# EAGLE library part BGB_741L7ESD_E6327 (library BGB_741L7ESD_E6327)
Infineon BGB741L7ESD BGB 741L7ESD E6327, RF Amplifier Low Noise, 21.5 dB 5 GHz, 6-Pin TSLP-7-1 Source: Datasheet <https://www.infineon.com/dgdl/Infineon-BGB741L7ESD-DS-v03_00-EN.pdf?fileId=5546d46265f064ff016638972c994ed7&redirId=115243>
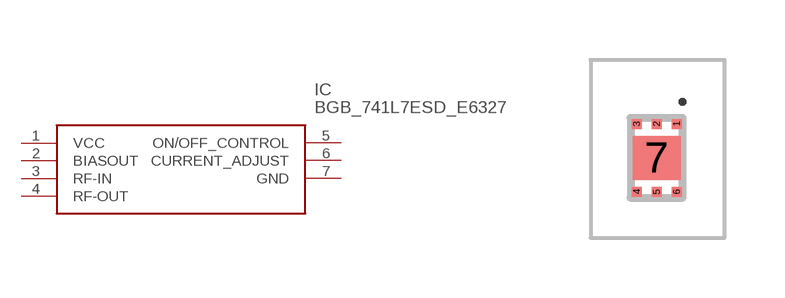
[diagram p0: symbol with the pads of BGB741L7ESDE6327; footprint BGB741L7ESDE6327]

Designator prefix IC

## BGB_741L7ESD_E6327 (Description: Infineon BGB741L7ESD BGB 741L7ESD E6327, RF Amplifier Low Noise, 21.5 dB 5 GHz, 6-Pin TSLP-7-1; Height: 0.55mm; Manufacturer_Name: Infineon; Manufacturer_Part_Number: BGB 741L7ESD E6327; Mouser_Part_Number: 726-BGB741L7ESDE63; Mouser_Price-Stock: https://www.mouser.co.uk/ProductDetail/Infineon-Technologies/BGB-741L7ESD-E6327?qs=nTClRYuuQBouXaJjSylDSQ%3D%3D)  [BGB741L7ESDE6327]
1  VCC
2  BIASOUT
3  RF-IN
4  RF-OUT
5  ON/OFF_CONTROL
6  CURRENT_ADJUST
7  GND

## Footprint BGB741L7ESDE6327 (pad centres in mm)
BGB 741L7ESD E6327-3
smd 0.25 x 0.25: 1 0.5,0.85; 2 0,0.85; 3 -0.5,0.85; 4 -0.5,-0.85; 5 0,-0.85; 6 0.5,-0.85
smd 1.2 x 1.1: 7 0,0